# Altium footprint library OST_OSTOQ027151.PcbLib: 1 footprints
Each footprint in its own frame and in the unit in brackets; x right, y up, seen from the top. Pads: shape width x height; smd on the part's side, far side on the other; paste and mask are expansions set on the pad; w line width, h text height; cw(c..) or ccw(c..) is an arc to the next point about the centre after c.
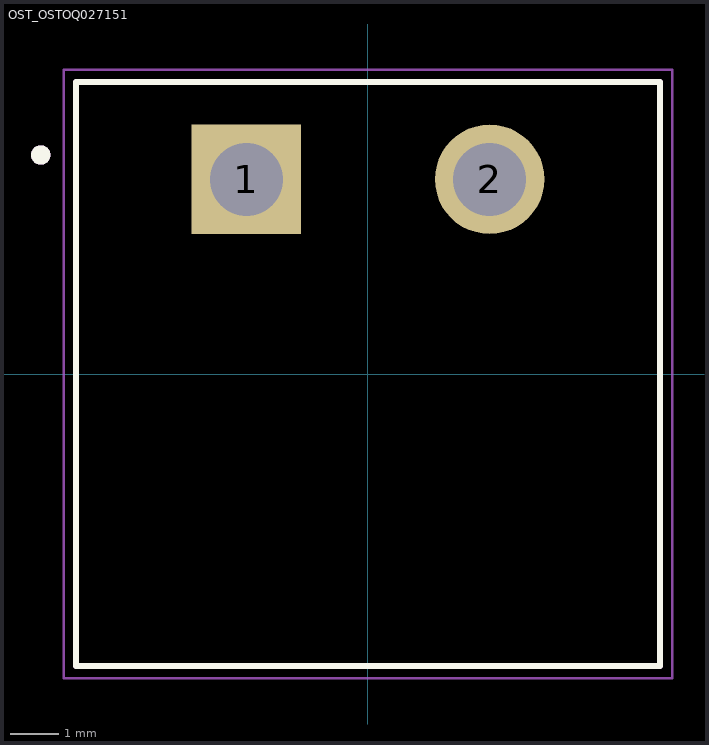
[diagram p0: the footprint, top view; thin cyan lines are the x and y axes]

## OST_OSTOQ027151 [mm]
height 8.5
pads (2):
  rect 2.25x2.25 / inner round 2.25 / far side rect 2.25x2.25 hole 1.5: 1(-2.5,4)
  round 2.25 hole 1.5: 2(2.5,4)
Top Overlay:
  circle w0.2: c-6.725,4.5 r0.1
  lines w0.127: -6,-6 -6,6 6,6 6,-6 -6,-6
Assembly Top:
  circle w0.2: c-6.725,4.5 r0.1
  lines w0.127: -6,-6 -6,6 6,6 6,-6 -6,-6
Courtyard Top:
  lines w0.05: -6.25,-6.25 -6.25,6.25 6.25,6.25 6.25,-6.25 -6.25,-6.25
3D body "step_temp.STEP": height 8.5, standoff -3.5, extent -6,-6 6,6